# Altium footprint library Flst_PcbLib.PcbLib: 23 footprints (part 1 of 2)
Each footprint in its own frame and in the unit in brackets; x right, y up, seen from the top. Pads: shape width x height; smd on the part's side, far side on the other; paste and mask are expansions set on the pad; w line width, h text height; cw(c..) or ccw(c..) is an arc to the next point about the centre after c.
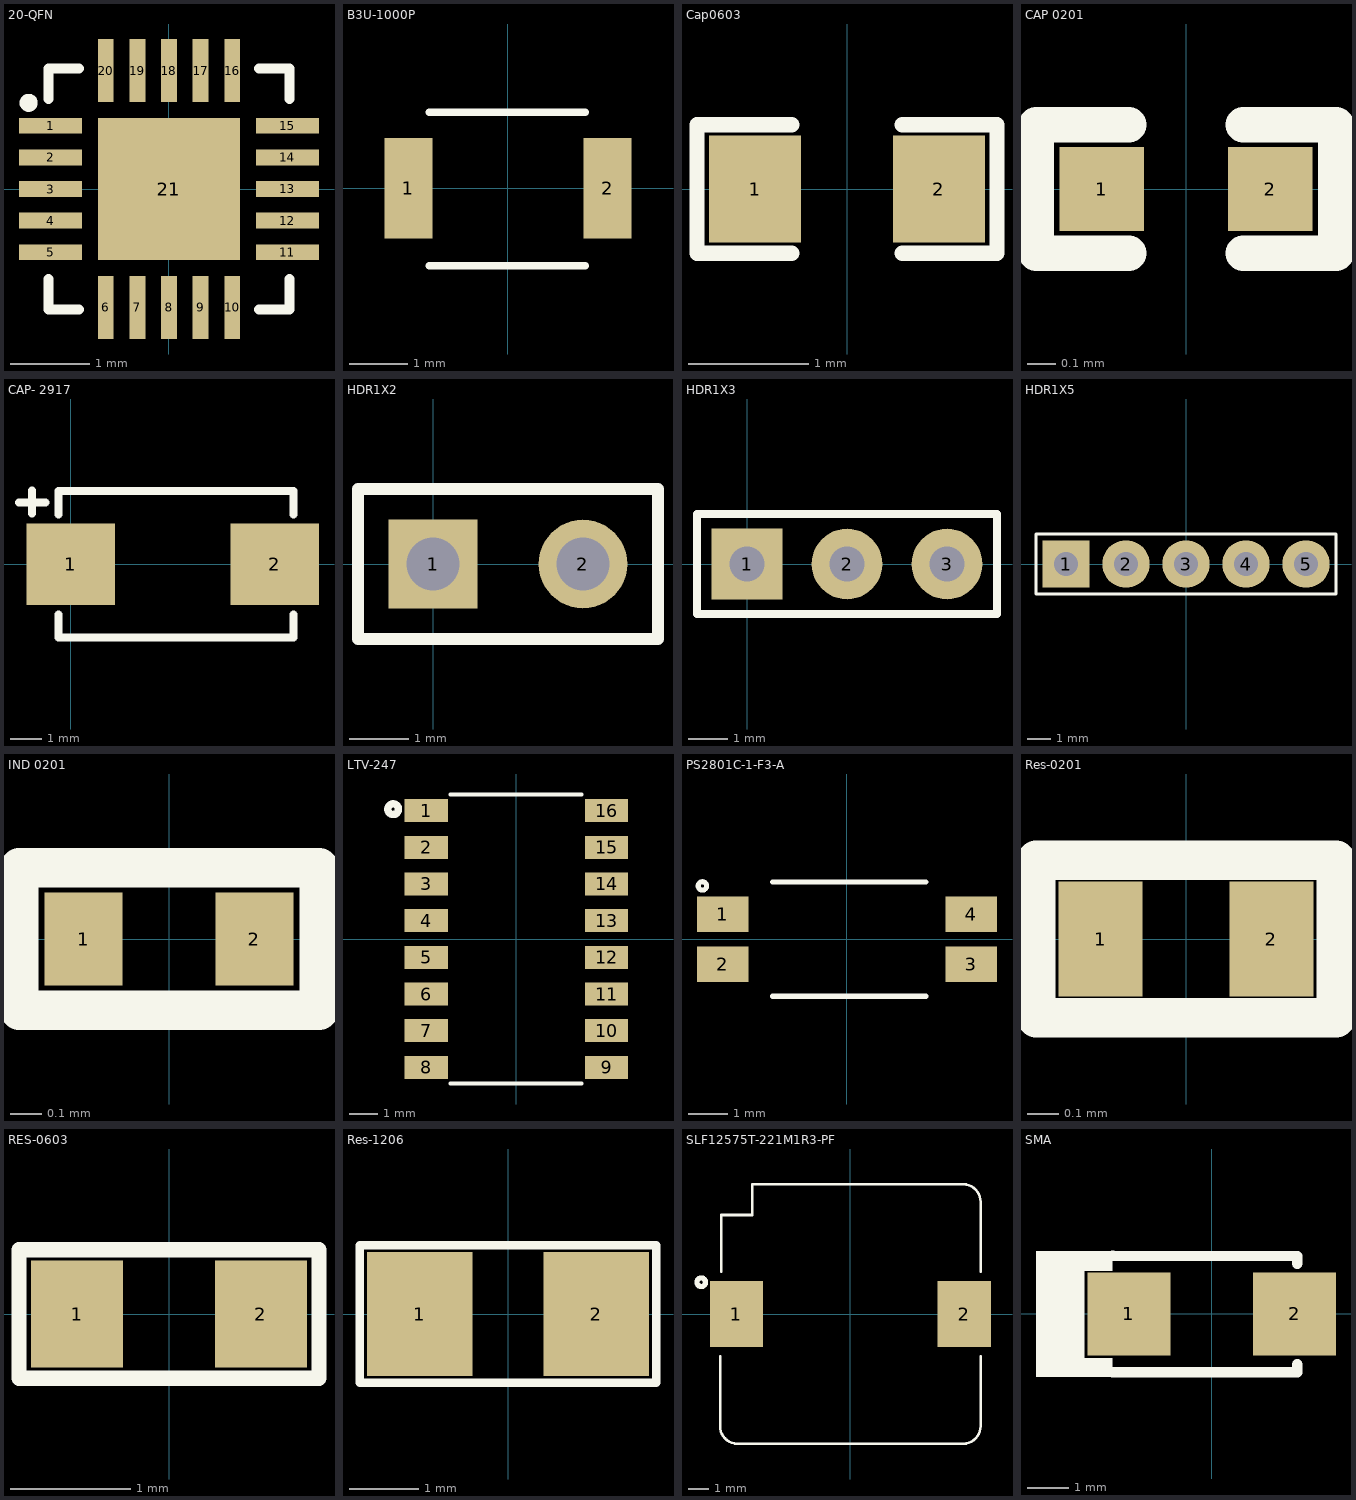
[diagram p0: the footprints below, top view; thin cyan lines are the x and y axes]

## 20-QFN [mm] "IC MCU 8BIT 16KB FLASH 20VQFN"
pads (21):
  rect 0.8x0.2 smd: 1(-1.5,0.8) 2(-1.5,0.4) 3(-1.5,0) 4(-1.5,-0.4) 5(-1.5,-0.8) 11(1.5,-0.8) 12(1.5,-0.4) 13(1.5,0) 14(1.5,0.4) 15(1.5,0.8)
  rect 0.2x0.8 smd: 6(-0.8,-1.5) 7(-0.4,-1.5) 8(0,-1.5) 9(0.4,-1.5) 10(0.8,-1.5) 16(0.8,1.5) 17(0.4,1.5) 18(0,1.5) 19(-0.4,1.5) 20(-0.8,1.5)
  rect 1.8x1.8 smd: 21(0,0)
Top Overlay:
  circle w0.127: c-1.778,1.092 r0.051
  lines w0.127: -1.524,-1.143 -1.524,-1.524 -1.143,-1.524 ; -1.524,1.143 -1.524,1.524 -1.143,1.524 ; 1.143,-1.524 1.524,-1.524 1.524,-1.143 ; 1.143,1.524 1.524,1.524 1.524,1.143
3D body "VQFN20_3X3_MCH.step": height 0.59, standoff 0, extent -1.499,-1.499 1.499,1.499

## B3U-1000P [mm] "SWITCH TACTILE SPST-NO 0.05A 12V"
pads (2):
  rect 0.82x1.72 smd: 1(-1.7,0) 2(1.7,0)
Top Overlay:
  lines w0.127: -1.346,-1.321 0,-1.321 1.321,-1.321 ; -1.346,1.295 0,1.295 1.321,1.295
3D body "User Library-OMRON B3U1000P.step": height 1.6, standoff 0, extent -2,-1.263 2,1.237

## Cap0603 [mil]
pads (2):
  rect 30x35 smd mask+2.36: 1(-30,0) 2(30,0)
Top Overlay:
  lines w5: -18,-21 -49,-21 -49,21 -18,21 ; 18,-21 49,-21 49,21 18,21
3D body "User Library-CAPC1608X09.step": height 34.25, standoff -1.18, extent -31.51,-15.75 31.49,15.74

## CAP 0201 [mm]
pads (2):
  rect 0.3x0.3 smd mask+0.055: 1(-0.3,0) 2(0.3,0)
Top Overlay:
  lines w0.127: -0.203,-0.229 -0.533,-0.229 -0.533,0.229 -0.203,0.229 ; 0.203,-0.229 0.533,-0.229 0.533,0.229 0.203,0.229
3D body "User Library-SMD Ceramic Capacitors_0201 (0603)_AB.STEP": height 0.28, standoff -0.02, extent -0.3,-0.15 0.301,0.15

## CAP- 2917 [mm]
pads (2):
  rect 2.79x2.57 smd: 1(0,0) 2(6.44,0)
Top Overlay:
  lines w0.254: -1.631,1.956 -0.793,1.956 ; -1.225,1.6 -1.225,2.337 ; -0.387,-1.575 -0.387,-2.311 7.03,-2.311 7.03,-1.575 ; -0.387,1.575 -0.387,2.311 7.03,2.311 7.03,1.575
3D body "593D D-CASE.stp": height 2.88, standoff -0.04, extent -0.273,-2.207 6.916,2.21

## HDR1X2 [mm] "CONN HEADER VERT 2POS 2.54MM"
pads (2):
  rect 1.5x1.5 hole 0.9: 1(0,0)
  round 1.5 hole 0.9: 2(2.54,0)
Top Overlay:
  lines w0.2: -1.27,-1.27 -1.27,1.27 3.81,1.27 3.81,-1.27 -1.27,-1.27
3D body "User Library-Header1x2.STEP": height 8.44, standoff -2.54, extent -1.27,-1.27 3.81,1.27

## HDR1X3 [mm] "Connector; Header; 3 Position"
pads (3):
  rect 1.8x1.8 hole 0.9: 1(0,0)
  round 1.8 hole 0.9: 2(2.54,0) 3(5.08,0)
Top Overlay:
  lines w0.2: -1.27,-1.27 -1.27,1.27 6.35,1.27 6.35,-1.27 -1.27,-1.27
3D body "User Library-Header_Male_3Pin.STEP": height 8.54, standoff -3, extent -1.27,-1.245 6.35,1.245

## HDR1X5 [mm] "Through Hole,P=2.54mm"
pads (5):
  rect 2x2 hole 1.02: 1(-5.08,0)
  round 2 hole 1.02: 2(-2.54,0) 3(0,0) 4(2.54,0) 5(5.08,0)
Top Overlay:
  lines w0.127: -6.35,-1.27 6.35,-1.27 6.35,1.27 -6.35,1.27 -6.35,-1.27
3D body "User Library-zl201-5_p2-54_l12-7_w2-54_h8-89.STEP": height 8.64, standoff -3.3, extent -6.35,-1.27 6.35,1.27

## IND 0201 [mm]
pads (2):
  rect 0.25x0.3 smd mask+0.055: 1(-0.275,0) 2(0.275,0)
Top Overlay:
  lines w0.127: -0.483,-0.229 -0.483,0.229 0.483,0.229 0.483,-0.229 -0.483,-0.229
3D body "742692005.stp": height 0.15, standoff -0.15, extent -0.3,-0.15 0.3,0.15

## LTV-247 [mm]
pads (16):
  rect 1.5x0.8 smd: 1(-3.125,4.445) 2(-3.125,3.175) 3(-3.125,1.905) 4(-3.125,0.635) 5(-3.125,-0.635) 6(-3.125,-1.905) 7(-3.125,-3.175) 8(-3.125,-4.445) 9(3.125,-4.445) 10(3.125,-3.175) 11(3.125,-1.905) 12(3.125,-0.635) 13(3.125,0.635) 14(3.125,1.905) 15(3.125,3.175) 16(3.125,4.445)
Top Overlay:
  circle w0.254: c-4.267,4.496 r0.185
  lines w0.127: -2.286,-5.004 2.261,-5.004 ; -2.286,5.004 2.261,5.004
3D body "User Library-SOIC-16-1.step": height 1.4, standoff 0, extent -3,-4.95 3,4.95

## PS2801C-1-F3-A [mm]
pads (4):
  rect 1.3x0.9 smd: 1(-3.15,0.635) 2(-3.15,-0.635) 3(3.15,-0.635) 4(3.15,0.635)
Top Overlay:
  circle w0.127: c-3.663,1.346 r0.107
  lines w0.127: -1.885,-1.448 2.001,-1.448 ; -1.885,1.448 2.001,1.448
3D body "User Library-SOP-4-1.step": height 2.1, standoff 0, extent -3.5,-1.4 3.5,1.4

## Res-0201 [mm]
pads (2):
  rect 0.27x0.37 smd: 1(-0.275,0) 2(0.275,0)
Top Overlay:
  lines w0.127: -0.483,-0.254 0.483,-0.254 0.483,0.254 -0.483,0.254 -0.483,-0.254
3D body "User Library-0201(0603M) Res.step": height 0.29, standoff -0.02, extent -0.305,-0.152 0.305,0.153

## RES-0603 [mil]
pads (2):
  rect 30x35 smd: 1(-30,0) 2(30,0)
Top Overlay:
  lines w5: -49,-21 -49,21 49,21 49,-21 -49,-21
3D body "User Library-RESC1608X05N.step": height 17.76, standoff 0, extent -30.52,-16.74 30.51,16.73

## Res-1206 [mil]
pads (2):
  rect 60x70 smd: 1(-50,0) 2(50,0)
Top Overlay:
  lines w5: -84,-39 -84,39 84,39 84,-39 -84,-39
3D body "User Library-1206 SMD Resistor.step": height 39.45, standoff 0, extent -62.99,-31.49 63,31.51

## SLF12575T-221M1R3-PF [mm]
pads (2):
  rect 2.6x3.2 smd: 1(-5.55,0) 2(5.55,0)
Top Overlay:
  circle w0.254: c-7.266,1.549 r0.209
  lines w0.127: -6.35,-2.057 -6.35,-5.461 ccw(c-5.499,-5.474) -5.512,-6.325 5.512,-6.325 ccw(c5.499,-5.474) 6.35,-5.461 6.35,-2.057 ; -6.299,2.057 -6.299,4.826 -4.775,4.826 -4.775,6.325 5.512,6.325 cw(c5.499,5.474) 6.35,5.461 6.35,2.057
3D body "slf12575.step": height 7.5, standoff 0, extent -6.275,-6.326 6.325,6.274

## SMA [mm]
pads (2):
  rect 2x2 smd: 1(-2,0) 2(2,0)
Top Overlay:
  rectangle: -4.242,-1.524 -3.075,1.524
  rectangle: -3.097,1.041 -2.393,1.524
  rectangle: -3.097,-1.524 -2.393,-1.067
  lines w0.254: -2.393,-1.408 2.057,-1.408 ; -2.393,1.408 2.061,1.397 2.061,1.219 ; 2.061,-1.408 2.061,-1.219
3D body "User Library-DO-214AC SMA.step": height 2.4, standoff 0, extent -2.6,-1.3 2.6,1.3